# Altium footprint library FootPrintLib_8.PcbLib: 590 footprints (part 19 of 37)
Each footprint in its own frame and in the unit in brackets; x right, y up, seen from the top. Pads: shape width x height; smd on the part's side, far side on the other; paste and mask are expansions set on the pad; w line width, h text height; cw(c..) or ccw(c..) is an arc to the next point about the centre after c.
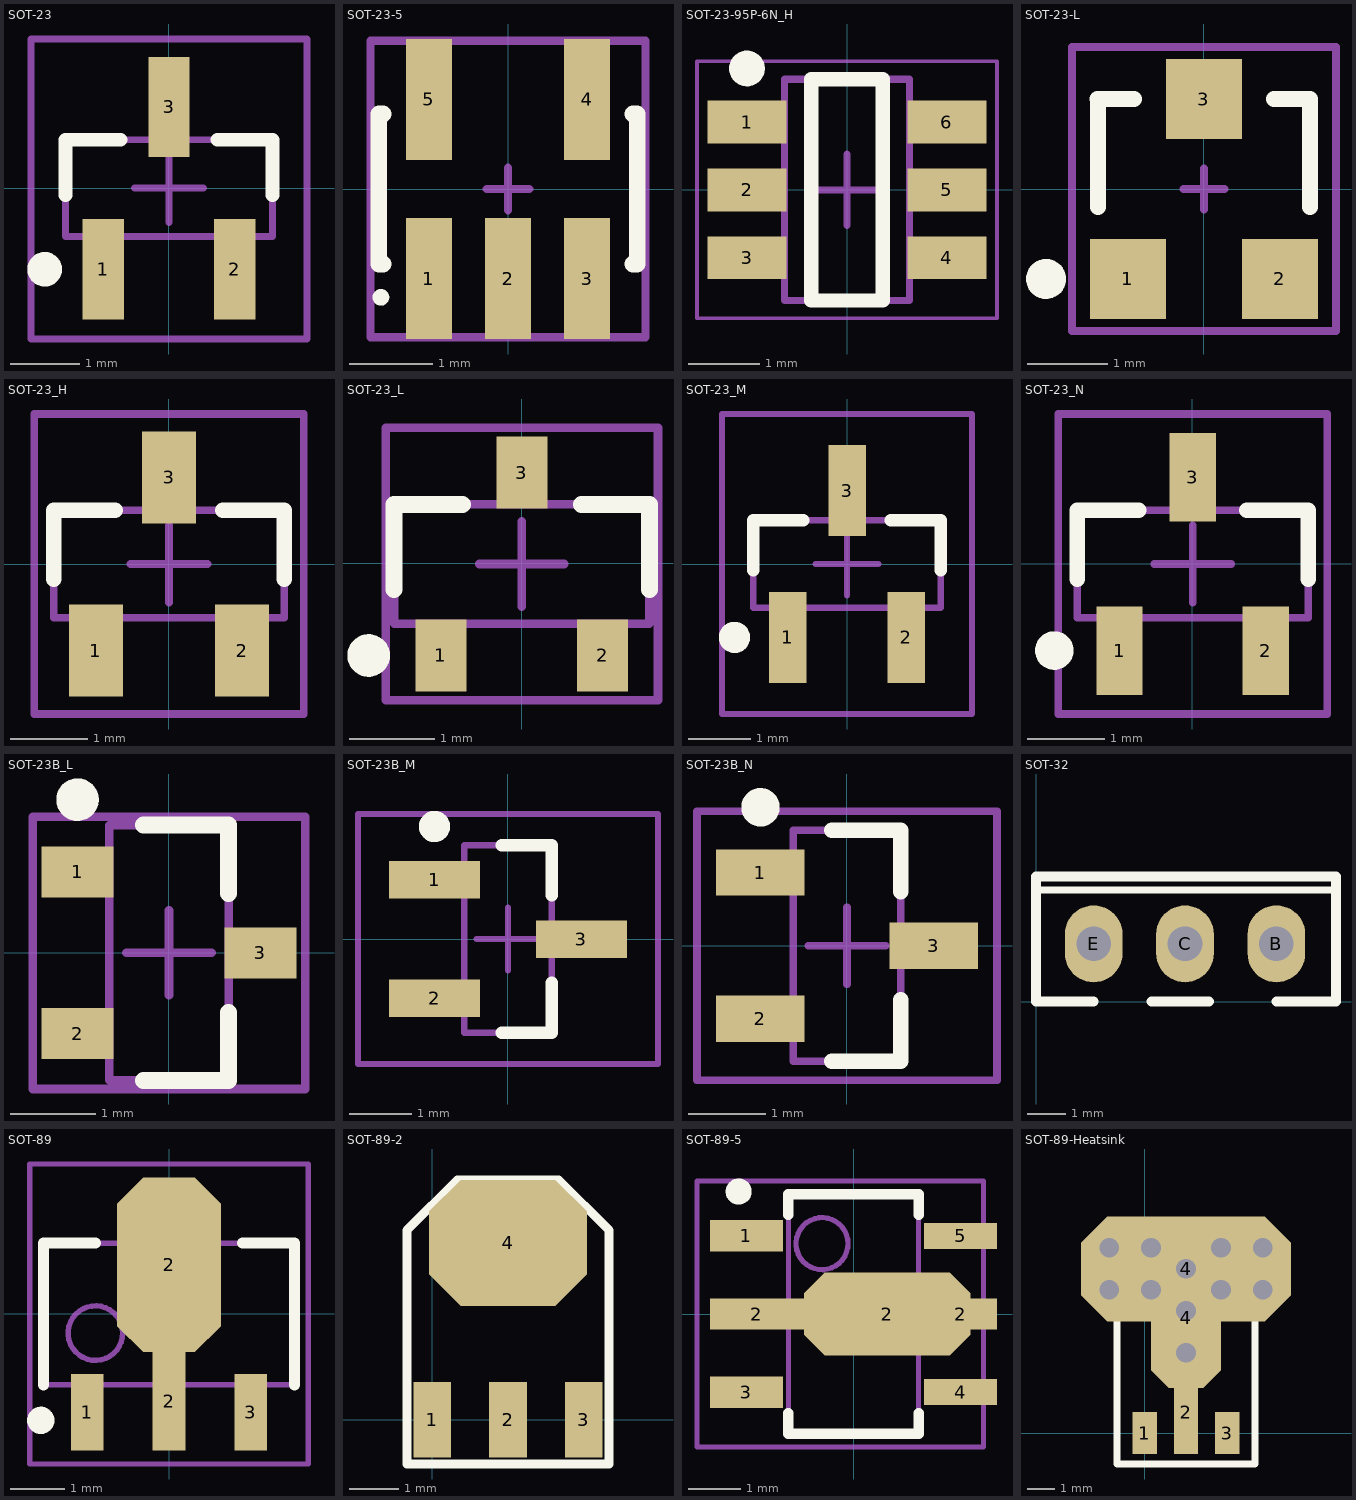
[diagram p18: the footprints below, top view; thin cyan lines are the x and y axes]

## SOT-23 [mm]
pads (3):
  rect 0.6x1.45 smd: 1(-0.95,-1.175) 2(0.95,-1.175) 3(0,1.175)
Top Overlay:
  circle w0.25: c-1.8,-1.175 r0.125
  lines w0.2: -1.5,-0.1 -1.5,0.7 -0.7,0.7 ; 0.7,0.7 1.5,0.7 1.5,-0.1
Mechanical 13:
  lines w0.1: -1.5,-0.7 1.5,-0.7 1.5,0.7 -1.5,0.7 -1.5,-0.7
Mechanical 15:
  lines w0.1: -0.5,0 0.5,0 ; 0,-0.5 0,0.5 ; -2,-2.184 2,-2.184 2,2.159 -2,2.159 -2,-2.184
3D body "User Library-N-MOS_BSS123_SOT23.STEP": height 1, standoff 0, extent -1.45,-1.225 1.45,1.075

## SOT-23-5 [mm] "SOT-23/SC-74A; 5 Leads; Body 3 x 3 mm, inc. leads (LxW max)"
height 1.45
pads (5):
  rect 0.55x1.45 smd: 1(-0.95,-1.075) 2(0,-1.075) 3(0.95,-1.075) 4(0.95,1.075) 5(-0.95,1.075)
Top Overlay:
  circle w0.1: c-1.525,-1.3 r0.05
  lines w0.2: -1.5,-0.9 -1.55,-0.9 -1.55,0.9 -1.5,0.9 ; 1.5,-0.9 1.55,-0.9 1.55,0.9 1.5,0.9
Mechanical 15:
  lines w0.1: -0.254,0 0.254,0 ; 0,-0.254 0,0.254 ; -1.651,-1.778 1.651,-1.778 1.651,1.778 -1.651,1.778 -1.651,-1.778
3D body "User Library-SOT23-5.step": height 1.45, standoff 0, extent -1.448,-1.397 1.452,1.403

## SOT-23-95P-6N_H [mm] "SOT23, 6-Leads, Body 2.95x2.80mm, Pitch 0.95mm, IPC Medium Density"
height 1.45
pads (6):
  rect 1.1x0.6 smd: 1(-1.4,0.95) 2(-1.4,0) 3(-1.4,-0.95) 4(1.4,-0.95) 5(1.4,0) 6(1.4,0.95)
Top Overlay:
  circle w0.25: c-1.4,1.7 r0.125
  lines w0.2: -0.5,-1.55 -0.5,1.55 0.5,1.55 0.5,-1.55 -0.5,-1.55
Mechanical 13:
  lines w0.1: -0.875,-1.55 0.875,-1.55 0.875,1.55 -0.875,1.55 -0.875,-1.55
Mechanical 15:
  lines w0.05: -2.1,-1.8 2.1,-1.8 2.1,1.8 -2.1,1.8 -2.1,-1.8
  lines w0.1: -0.5,0 0.5,0 ; 0,-0.5 0,0.5
3D body "User Library-SOT23-6.STEP": height 1.3, standoff 0, extent -1.5,-1.5 1.5,1.5

## SOT-23-L [mm]
height 0.9
pads (3):
  rect 0.95x1 smd: 1(-0.95,-1.125) 2(0.95,-1.125) 3(0,1.125)
Top Overlay:
  circle w0.25: c-1.975,-1.125 r0.125
  lines w0.2: -1.328,1.125 -0.875,1.125 ; -1.325,-0.225 -1.325,1.125 ; 0.875,1.125 1.325,1.125 1.325,-0.225
Mechanical 15:
  lines w0.1: -0.254,0 0.254,0 ; 0,-0.254 0,0.254 ; -1.651,-1.778 1.651,-1.778 1.651,1.778 -1.651,1.778 -1.651,-1.778
3D body "User Library-SOT23-3.step": height 1.3, standoff 0, extent -1.448,-1.397 1.452,1.403

## SOT-23_H [mm] "SOT23, 3-Leads, Body 2.9x1.3mm, Pitch 0.95mm, Lead Span 2.5mm, IPC Medium Density"
height 1.1
pads (3):
  rect 0.7x1.2 smd: 1(-0.95,-1.125) 2(0.95,-1.125) 3(0,1.125)
Top Overlay:
  lines w0.2: -1.5,-0.2 -1.5,0.7 -0.7,0.7 ; 0.7,0.7 1.5,0.7 1.5,-0.2
Mechanical 13:
  lines w0.1: -1.5,-0.7 1.5,-0.7 1.5,0.7 -1.5,0.7 -1.5,-0.7
Mechanical 15:
  lines w0.1: -0.5,0 0.5,0 ; 0,-0.5 0,0.5 ; -1.75,-1.95 1.75,-1.95 1.75,1.95 -1.75,1.95 -1.75,-1.95
3D body "SOT-23-3.STEP": height 1.01, standoff 0, extent -1.5,-1.25 1.5,1.25

## SOT-23_L [mm] "SOT23, 3-Leads, Body 2.9x1.3mm, Pitch 0.95mm, Lead Span 2.5mm, IPC High Density"
height 1.1
pads (3):
  rect 0.6x0.85 smd: 1(-0.949,-1.083) 2(0.951,-1.083) 3(0.001,1.067)
Top Overlay:
  circle w0.25: c-1.799,-1.083 r0.125
  lines w0.2: -1.499,-0.308 -1.499,0.692 -0.699,0.692 ; 0.701,0.692 1.501,0.692 1.501,-0.308
Mechanical 13:
  lines w0.1: -1.499,-0.708 1.501,-0.708 1.501,0.692 -1.499,0.692 -1.499,-0.708
Mechanical 15:
  lines w0.1: -0.499,-0.008 0.501,-0.008 ; 0.001,-0.508 0.001,0.492 ; -1.599,-1.608 1.601,-1.608 1.601,1.592 -1.599,1.592 -1.599,-1.608
3D body: height 1.1, standoff 0, extent -1.499,-0.708 1.501,0.692

## SOT-23_M [mm] "SOT23, 3-Leads, Body 2.9x1.3mm, Pitch 0.95mm, Lead Span 2.5mm, IPC Low Density"
height 1.1
pads (3):
  rect 0.6x1.45 smd: 1(-0.952,-1.175) 2(0.948,-1.175) 3(-0.002,1.175)
Top Overlay:
  circle w0.25: c-1.802,-1.175 r0.125
  lines w0.2: -1.502,-0.1 -1.502,0.7 -0.702,0.7 ; 0.698,0.7 1.498,0.7 1.498,-0.1
Mechanical 13:
  lines w0.1: -1.502,-0.7 1.498,-0.7 1.498,0.7 -1.502,0.7 -1.502,-0.7
Mechanical 15:
  lines w0.1: -0.502,0 0.498,0 ; -0.002,-0.5 -0.002,0.5 ; -2.002,-2.4 1.998,-2.4 1.998,2.4 -2.002,2.4 -2.002,-2.4
3D body: height 1.1, standoff 0, extent -1.502,-0.7 1.498,0.7

## SOT-23_N [mm] "SOT23, 3-Leads, Body 2.9x1.3mm, Pitch 0.95mm, Lead Span 2.5mm, IPC Medium Density"
height 1.1
pads (3):
  rect 0.6x1.15 smd: 1(-0.944,-1.126) 2(0.956,-1.126) 3(0.006,1.124)
Top Overlay:
  circle w0.25: c-1.794,-1.126 r0.125
  lines w0.2: -1.494,-0.201 -1.494,0.699 -0.694,0.699 ; 0.706,0.699 1.506,0.699 1.506,-0.201
Mechanical 13:
  lines w0.1: -1.494,-0.701 1.506,-0.701 1.506,0.699 -1.494,0.699 -1.494,-0.701
Mechanical 15:
  lines w0.1: -0.494,-0.001 0.506,-0.001 ; 0.006,-0.501 0.006,0.499 ; -1.744,-1.951 1.756,-1.951 1.756,1.949 -1.744,1.949 -1.744,-1.951
3D body: height 1.1, standoff 0, extent -1.494,-0.701 1.506,0.699

## SOT-23B_L [mm] "SOT23, 3-Leads, Body 2.9x1.3mm, Pitch 0.95mm, Lead Span 2.4mm, IPC High Density"
height 1.14
pads (3):
  rect 0.85x0.6 smd: 1(-1.075,0.95) 2(-1.075,-0.95) 3(1.075,0)
Top Overlay:
  circle w0.25: c-1.075,1.8 r0.125
  lines w0.2: -0.3,-1.5 0.7,-1.5 0.7,-0.7 ; -0.3,1.5 0.7,1.5 0.7,0.7
Mechanical 13:
  lines w0.1: -0.7,-1.5 -0.7,1.5 0.7,1.5 0.7,-1.5 -0.7,-1.5
Mechanical 15:
  lines w0.1: -0.5,0 0.5,0 ; 0,-0.5 0,0.5 ; -1.6,-1.6 -1.6,1.6 1.6,1.6 1.6,-1.6 -1.6,-1.6
3D body: height 1.14, standoff 0, extent -0.7,-1.5 0.7,1.5

## SOT-23B_M [mm] "SOT23, 3-Leads, Body 2.9x1.3mm, Pitch 0.95mm, Lead Span 2.4mm, IPC Low Density"
height 1.14
pads (3):
  rect 1.45x0.6 smd: 1(-1.175,0.95) 2(-1.175,-0.95) 3(1.175,0)
Top Overlay:
  circle w0.25: c-1.175,1.8 r0.125
  lines w0.2: -0.1,-1.5 0.7,-1.5 0.7,-0.7 ; -0.1,1.5 0.7,1.5 0.7,0.7
Mechanical 13:
  lines w0.1: -0.7,-1.5 0.7,-1.5 0.7,1.5 -0.7,1.5 -0.7,-1.5
Mechanical 15:
  lines w0.1: -0.5,0 0.5,0 ; 0,-0.5 0,0.5 ; -2.4,-2 2.4,-2 2.4,2 -2.4,2 -2.4,-2
3D body: height 1.14, standoff 0, extent -0.7,-1.5 0.7,1.5

## SOT-23B_N [mm] "SOT23, 3-Leads, Body 2.9x1.3mm, Pitch 0.95mm, Lead Span 2.4mm, IPC Medium Density"
height 1.14
pads (3):
  rect 1.15x0.6 smd: 1(-1.125,0.95) 2(-1.125,-0.95) 3(1.125,0)
Top Overlay:
  circle w0.25: c-1.125,1.8 r0.125
  lines w0.2: -0.2,-1.5 0.7,-1.5 0.7,-0.7 ; -0.2,1.5 0.7,1.5 0.7,0.7
Mechanical 13:
  lines w0.1: -0.7,-1.5 0.7,-1.5 0.7,1.5 -0.7,1.5 -0.7,-1.5
Mechanical 15:
  lines w0.1: -0.5,0 0.5,0 ; 0,-0.5 0,0.5 ; -1.95,-1.75 1.95,-1.75 1.95,1.75 -1.95,1.75 -1.95,-1.75
3D body: height 1.14, standoff 0, extent -0.7,-1.5 0.7,1.5

## SOT-32 [mm]
pads (3):
  oval 1.5x2 hole 0.9: B(6.25,1.5) C(3.875,1.5) E(1.5,1.5)
Top Overlay:
  lines w0.18: 0,2.9 7.8,2.9
  lines w0.254: 1.5,0 0,0 0,3.25 7.8,3.25 7.8,0 ; 3,0 4.5,0 ; 6.25,0 7.75,0

## SOT-89 [mm] "SOT-89-3L SMT PACKAGE"
height 1.6
pads (4):
  rect 0.6x1.4 smd: 1(-1.509,-1.806) 3(1.491,-1.806)
  rect 0.6x1.8 smd: 2(-0.009,-1.606)
  oct 1.9x3.2 smd: 2(-0.009,0.894)
Top Overlay:
  circle w0.25: c-2.359,-1.956 r0.125
  lines w0.2: -2.309,-1.306 -2.309,1.294 -1.359,1.294 ; 1.341,1.294 2.291,1.294 2.291,-1.306
Mechanical 13:
  circle w0.1: c-1.359,-0.356 r0.5
  lines w0.1: -2.309,-1.306 2.291,-1.306 2.291,1.294 -2.309,1.294 -2.309,-1.306
Mechanical 15:
  lines w0.1: -0.509,-0.006 0.491,-0.006 ; -0.009,-0.506 -0.009,0.494 ; -2.559,-2.756 2.541,-2.756 2.541,2.744 -2.559,2.744 -2.559,-2.756
3D body "User Library-SOT89.STEP": height 1.57, standoff -0.04, extent -2.309,-2.292 2.291,1.958

## SOT-89-2 [mil]
pads (4):
  rect 30x60 smd: 1(0,0) 2(60,0) 3(120,0)
  oct 125x100 smd: 4(60,140)
Top Overlay:
  lines w7: -20,-35 -20,150 20,190 100,190 140,150 140,-35 -20,-35

## SOT-89-5 [mm] "SOT-89-5L SMT PACKAGE"
height 1.6
pads (7):
  rect 1.4x0.6 smd: 1(-2.054,1.5) 2(2.054,0) 3(-2.054,-1.5)
  rect 1.8x0.6 smd: 2(-1.854,0)
  oct 3.2x1.6 smd: 2(0.646,0)
  rect 1.4x0.5 smd: 4(2.054,-1.5) 5(2.054,1.5)
Top Overlay:
  circle w0.25: c-2.204,2.35 r0.125
  lines w0.2: -1.25,-1.9 -1.25,-2.3 1.25,-2.3 1.25,-1.9 ; -1.25,1.9 -1.25,2.3 1.25,2.3 1.25,1.9
Mechanical 13:
  circle w0.1: c-0.604,1.35 r0.5
  lines w0.1: -1.25,-2.3 1.25,-2.3 1.25,2.3 -1.25,2.3 -1.25,-2.3
Mechanical 15:
  lines w0.1: -0.754,0 0.246,0 ; -0.254,-0.5 -0.254,0.5 ; -3.004,-2.55 2.496,-2.55 2.496,2.55 -3.004,2.55 -3.004,-2.55
3D body "User Library-SOT89-5.step": height 1.54, standoff 0, extent -2.25,-2.25 2.25,2.25

## SOT-89-Heatsink [mil]
pads (5):
  rect 35x60 smd: 1(0,0) 3(118.11,0)
  rect 35x120 smd: 2(59.06,30)
  oct 100x200 all layers, no hole: 4(59.05,164.63)
  oct 300x150 all layers, no hole: 4(59.05,234.63)
via 59.05,114.63 diameter 50 hole 28
via 59.05,174.63 diameter 50 hole 28
via -50.95,264.63 diameter 50 hole 28
via -50.95,204.63 diameter 50 hole 28
via 9.05,264.63 diameter 50 hole 28
via 9.05,204.63 diameter 50 hole 28
via 109.06,264.63 diameter 50 hole 28
via 59.05,234.63 diameter 50 hole 28
via 169.06,264.63 diameter 50 hole 28
via 169.06,204.63 diameter 50 hole 28
via 109.06,204.63 diameter 50 hole 28
Top Overlay:
  lines w10: -39.37,191.93 -39.37,-44.29 157.48,-44.29 157.48,191.93